# Altium footprint library Francisco_PCB.PcbLib: 51 footprints (part 4 of 4)
Each footprint in its own frame and in the unit in brackets; x right, y up, seen from the top. Pads: shape width x height; smd on the part's side, far side on the other; paste and mask are expansions set on the pad; w line width, h text height; cw(c..) or ccw(c..) is an arc to the next point about the centre after c.
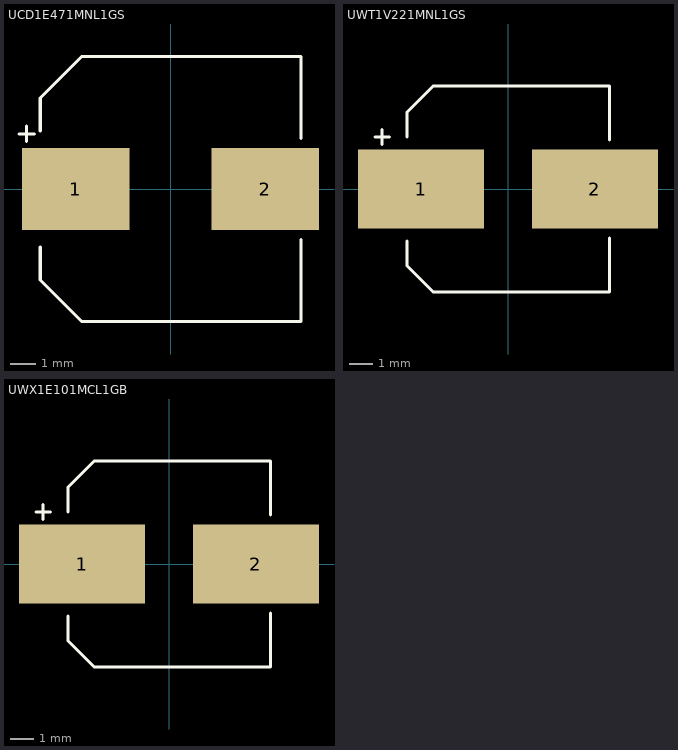
[diagram p3: the footprints below, top view; thin cyan lines are the x and y axes]

## UCD1E471MNL1GS [mm]
pads (2):
  rect 4.3x3.3 smd: 1(-3.8,0) 2(3.8,0)
Top Overlay:
  lines w0.127: -6.071,2.21 -5.461,2.21 ; -5.766,1.905 -5.766,2.515 ; -5.22,-2.337 -5.22,-3.645 -3.556,-5.309 5.232,-5.309 5.232,-2.032 ; -5.22,2.337 -5.22,3.645 -3.556,5.309 5.232,5.309 5.232,2.032
3D body "PCAP_10x10-ELECT_NCA.step": height 10.54, standoff 0, extent -5.626,-5.245 5.576,5.245

## UWT1V221MNL1GS [mm]
pads (2):
  rect 5.3x3.3 smd: 1(-3.65,0) 2(3.65,0)
Top Overlay:
  lines w0.127: -5.588,2.184 -4.978,2.184 ; -5.283,1.88 -5.283,2.489 ; -4.242,-2.184 -4.242,-3.226 -3.15,-4.318 4.267,-4.318 4.267,-2.057 ; -4.242,2.184 -4.242,3.226 -3.15,4.318 4.267,4.318 4.267,2.057
3D body "PCAP_8x10-ELECT_NCA.step": height 10.34, standoff 0, extent -4.648,-4.254 4.648,4.254

## UWX1E101MCL1GB [mm]
pads (2):
  rect 5.3x3.3 smd: 1(-3.65,0) 2(3.65,0)
Top Overlay:
  lines w0.127: -5.588,2.184 -4.978,2.184 ; -5.283,1.88 -5.283,2.489 ; -4.242,-2.184 -4.242,-3.226 -3.15,-4.318 4.267,-4.318 4.267,-2.057 ; -4.242,2.184 -4.242,3.226 -3.15,4.318 4.267,4.318 4.267,2.057
3D body "PCAP_8x10-ELECT_NCA.step": height 10.34, standoff 0, extent -4.648,-4.254 4.648,4.254